# Altium footprint library 2019-12-02_14-04-43.PcbLib: 3 footprints
Each footprint in its own frame and in the unit in brackets; x right, y up, seen from the top. Pads: shape width x height; smd on the part's side, far side on the other; paste and mask are expansions set on the pad; w line width, h text height; cw(c..) or ccw(c..) is an arc to the next point about the centre after c.
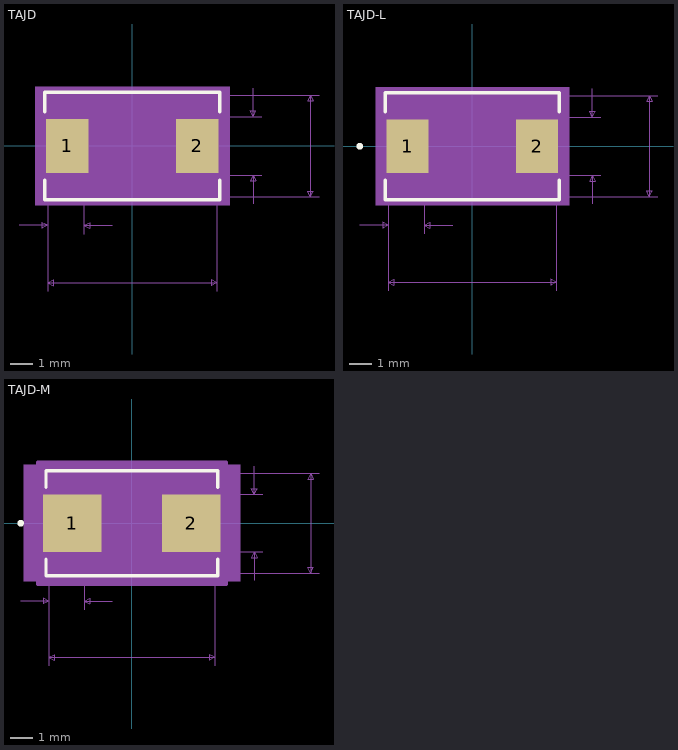
[diagram p0: the footprints below, top view; thin cyan lines are the x and y axes]

## TAJD [mil]
pads (2):
  rect 74x94 smd paste+0 mask+0: 1(-113.5,0) 2(113.5,0)
Top Overlay:
  lines w6: -152.5,-59.95 -152.5,-93.5 152.5,-93.5 152.5,-59.95 ; -152.5,59.95 -152.5,93.5 152.5,93.5 152.5,59.95
Mechanical 5:
  region: 169.5,-103.5 -169.5,-103.5 -169.5,103.5 169.5,103.5
Mechanical 7:
  lines w1: -197.5,-138.5 -147.5,-138.5 ; -147.5,-253.5 -147.5,0 -147.5,-153.5 ; -84.5,-153.5 -84.5,0 ; -34.5,-138.5 -84.5,-138.5 ; 147.5,-253.5 147.5,0 ; 160.5,-88.5 325.5,-88.5 ; 160.5,-51 225.5,-51 ; 160.5,51 225.5,51 ; 160.5,88.5 325.5,88.5 ; 210.5,-101 210.5,-51 ; 210.5,101 210.5,51 ; -147.5,-238.5 147.5,-238.5 ; -147.5,-238.5 -137.5,-233.5 -137.5,-243.5 -147.5,-238.5 ; -147.5,-138.5 -157.5,-133.5 -157.5,-143.5 -147.5,-138.5 ; -84.5,-138.5 -74.5,-133.5 -74.5,-143.5 -84.5,-138.5 ; 147.5,-238.5 137.5,-233.5 137.5,-243.5 147.5,-238.5 ; 210.5,-51 205.5,-61 215.5,-61 210.5,-51 ; 210.5,51 205.5,61 215.5,61 210.5,51 ; 310.5,-88.5 310.5,88.5 ; 310.5,-88.5 305.5,-78.5 315.5,-78.5 310.5,-88.5 ; 310.5,88.5 305.5,78.5 315.5,78.5 310.5,88.5
  text "Default Padstyle: RX74Y94D0T" at -350,-363.5 h50
  text "Alt 1 Padstyle: OX60Y90D30P" at -337.5,-438.5 h50
  text "Alt 2 Padstyle: OX90Y60D30P" at -337.5,-513.5 h50
  text "0.102in/2.591mm" at 230.5,-12.5 h25
  text "0.177in/4.496mm" at 330.5,-12.5 h25
  text "0.295in/7.493mm" at -93.75,-283.5 h25
  text "0.063in/1.6mm" at -197.25,-183.5 h25
Mechanical 13:
  circle w0: c-137.5,0 r0
  lines w1: -147.5,-88.5 147.5,-88.5 147.5,88.5 -147.5,88.5 -147.5,-88.5
Mechanical 15:
  region: -151.5,-51 -154.5,-51 -154.5,51 -151.5,51 -151.5,92.5 151.5,92.5 151.5,51 154.5,51 154.5,-51 151.5,-51 151.5,-92.5 -151.5,-92.5
  lines w6: -154.5,-51 -154.5,51 -151.5,51 -151.5,92.5 151.5,92.5 151.5,51 154.5,51 154.5,-51 151.5,-51 151.5,-92.5 -151.5,-92.5 -151.5,-51 -154.5,-51
3D body: height 10, standoff 0, extent 0,0 10,10

## TAJD-L [mil]
pads (2):
  rect 74x94 smd paste+0 mask+0: 1(-113.5,0) 2(113.5,0)
Top Overlay:
  circle w6: c-197.5,0 r3
  lines w6: -152.5,-59.95 -152.5,-93.5 152.5,-93.5 152.5,-59.95 ; -152.5,59.95 -152.5,93.5 152.5,93.5 152.5,59.95
Mechanical 5:
  region: 169.5,-103.5 -169.5,-103.5 -169.5,103.5 169.5,103.5
Mechanical 7:
  lines w1: -197.5,-138.5 -147.5,-138.5 ; -147.5,-253.5 -147.5,0 -147.5,-153.5 ; -84.5,-153.5 -84.5,0 ; -34.5,-138.5 -84.5,-138.5 ; 147.5,-253.5 147.5,0 ; 160.5,-88.5 325.5,-88.5 ; 160.5,-51 225.5,-51 ; 160.5,51 225.5,51 ; 160.5,88.5 325.5,88.5 ; 210.5,-101 210.5,-51 ; 210.5,101 210.5,51 ; -147.5,-238.5 147.5,-238.5 ; -147.5,-238.5 -137.5,-233.5 -137.5,-243.5 -147.5,-238.5 ; -147.5,-138.5 -157.5,-133.5 -157.5,-143.5 -147.5,-138.5 ; -84.5,-138.5 -74.5,-133.5 -74.5,-143.5 -84.5,-138.5 ; 147.5,-238.5 137.5,-233.5 137.5,-243.5 147.5,-238.5 ; 210.5,-51 205.5,-61 215.5,-61 210.5,-51 ; 210.5,51 205.5,61 215.5,61 210.5,51 ; 310.5,-88.5 310.5,88.5 ; 310.5,-88.5 305.5,-78.5 315.5,-78.5 310.5,-88.5 ; 310.5,88.5 305.5,78.5 315.5,78.5 310.5,88.5
  text "Default Padstyle: RX74Y94D0T" at -350,-363.5 h50
  text "Alt 1 Padstyle: OX60Y90D30P" at -337.5,-438.5 h50
  text "Alt 2 Padstyle: OX90Y60D30P" at -337.5,-513.5 h50
  text "0.102in/2.591mm" at 230.5,-12.5 h25
  text "0.177in/4.496mm" at 330.5,-12.5 h25
  text "0.295in/7.493mm" at -93.75,-283.5 h25
  text "0.063in/1.6mm" at -197.25,-183.5 h25
Mechanical 13:
  circle w0: c-137.5,0 r3
  lines w1: -147.5,-88.5 147.5,-88.5 147.5,88.5 -147.5,88.5 -147.5,-88.5
Mechanical 15:
  region: -151.5,-51 -154.5,-51 -154.5,51 -151.5,51 -151.5,92.5 151.5,92.5 151.5,51 154.5,51 154.5,-51 151.5,-51 151.5,-92.5 -151.5,-92.5
  lines w6: -154.5,-51 -154.5,51 -151.5,51 -151.5,92.5 151.5,92.5 151.5,51 154.5,51 154.5,-51 151.5,-51 151.5,-92.5 -151.5,-92.5 -151.5,-51 -154.5,-51
3D body: height 10, standoff 0, extent 0,0 10,10

## TAJD-M [mil]
pads (2):
  rect 104x102 smd paste+0 mask+0: 1(-105.5,0) 2(105.5,0)
Top Overlay:
  circle w6: c-197.5,0 r3
  lines w6: -152.5,-64.1 -152.5,-93.5 152.5,-93.5 152.5,-64.1 ; -152.5,64.1 -152.5,93.5 152.5,93.5 152.5,64.1
Mechanical 5:
  region: 192.5,-103.5 -192.5,-103.5 -192.5,103.5 192.5,103.5
Mechanical 7:
  lines w1: -197.5,-138.5 -147.5,-138.5 ; -147.5,-253.5 -147.5,0 -147.5,-153.5 ; -84.5,-153.5 -84.5,0 ; -34.5,-138.5 -84.5,-138.5 ; 147.5,-253.5 147.5,0 ; 167.5,-88.5 332.5,-88.5 ; 167.5,-51 232.5,-51 ; 167.5,51 232.5,51 ; 167.5,88.5 332.5,88.5 ; 217.5,-101 217.5,-51 ; 217.5,101 217.5,51 ; -147.5,-238.5 147.5,-238.5 ; -147.5,-238.5 -137.5,-233.5 -137.5,-243.5 -147.5,-238.5 ; -147.5,-138.5 -157.5,-133.5 -157.5,-143.5 -147.5,-138.5 ; -84.5,-138.5 -74.5,-133.5 -74.5,-143.5 -84.5,-138.5 ; 147.5,-238.5 137.5,-233.5 137.5,-243.5 147.5,-238.5 ; 217.5,-51 212.5,-61 222.5,-61 217.5,-51 ; 217.5,51 212.5,61 222.5,61 217.5,51 ; 317.5,-88.5 317.5,88.5 ; 317.5,-88.5 312.5,-78.5 322.5,-78.5 317.5,-88.5 ; 317.5,88.5 312.5,78.5 322.5,78.5 317.5,88.5
  text "Default Padstyle: RX104Y102D0T" at -375,-363.5 h50
  text "Alt 1 Padstyle: OX60Y90D30P" at -337.5,-438.5 h50
  text "Alt 2 Padstyle: OX90Y60D30P" at -337.5,-513.5 h50
  text "0.102in/2.591mm" at 237.5,-12.5 h25
  text "0.177in/4.496mm" at 337.5,-12.5 h25
  text "0.295in/7.493mm" at -93.75,-283.5 h25
  text "0.063in/1.6mm" at -197.25,-183.5 h25
Mechanical 13:
  circle w0: c-137.5,0 r3
  lines w1: -147.5,-88.5 147.5,-88.5 147.5,88.5 -147.5,88.5 -147.5,-88.5
Mechanical 15:
  region: -167.5,-71 -177.5,-71 -177.5,71 -167.5,71 -167.5,108.5 167.5,108.5 167.5,71 177.5,71 177.5,-71 167.5,-71 167.5,-108.5 -167.5,-108.5
  lines w6: -177.5,-71 -177.5,71 -167.5,71 -167.5,108.5 167.5,108.5 167.5,71 177.5,71 177.5,-71 167.5,-71 167.5,-108.5 -167.5,-108.5 -167.5,-71 -177.5,-71
3D body: height 10, standoff 0, extent 0,0 10,10